# Altium schematic symbol library Y2_CAP.SchLib: 1 symbol
Pins are listed as number, name and electrical type; pins without a type are passive.

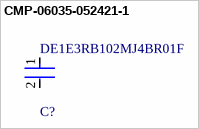
[diagram p0: symbol CMP-06035-052421-1]

## CMP-06035-052421-1
designator C?, comment DE1E3RB102MJ4BR01F
Cap Ceramic Disc 1000pF 20% 500VAC Thru-Hole 8.0x6.0x10.0 Bulk
footprint FP-DE1_D8_T6_F10_d0_6-0_0-MFG
pins: 1, 2